# Altium footprint library CustomCase.PcbLib: 411 footprints (part 8 of 26)
Each footprint in its own frame and in the unit in brackets; x right, y up, seen from the top. Pads: shape width x height; smd on the part's side, far side on the other; paste and mask are expansions set on the pad; w line width, h text height; cw(c..) or ccw(c..) is an arc to the next point about the centre after c.
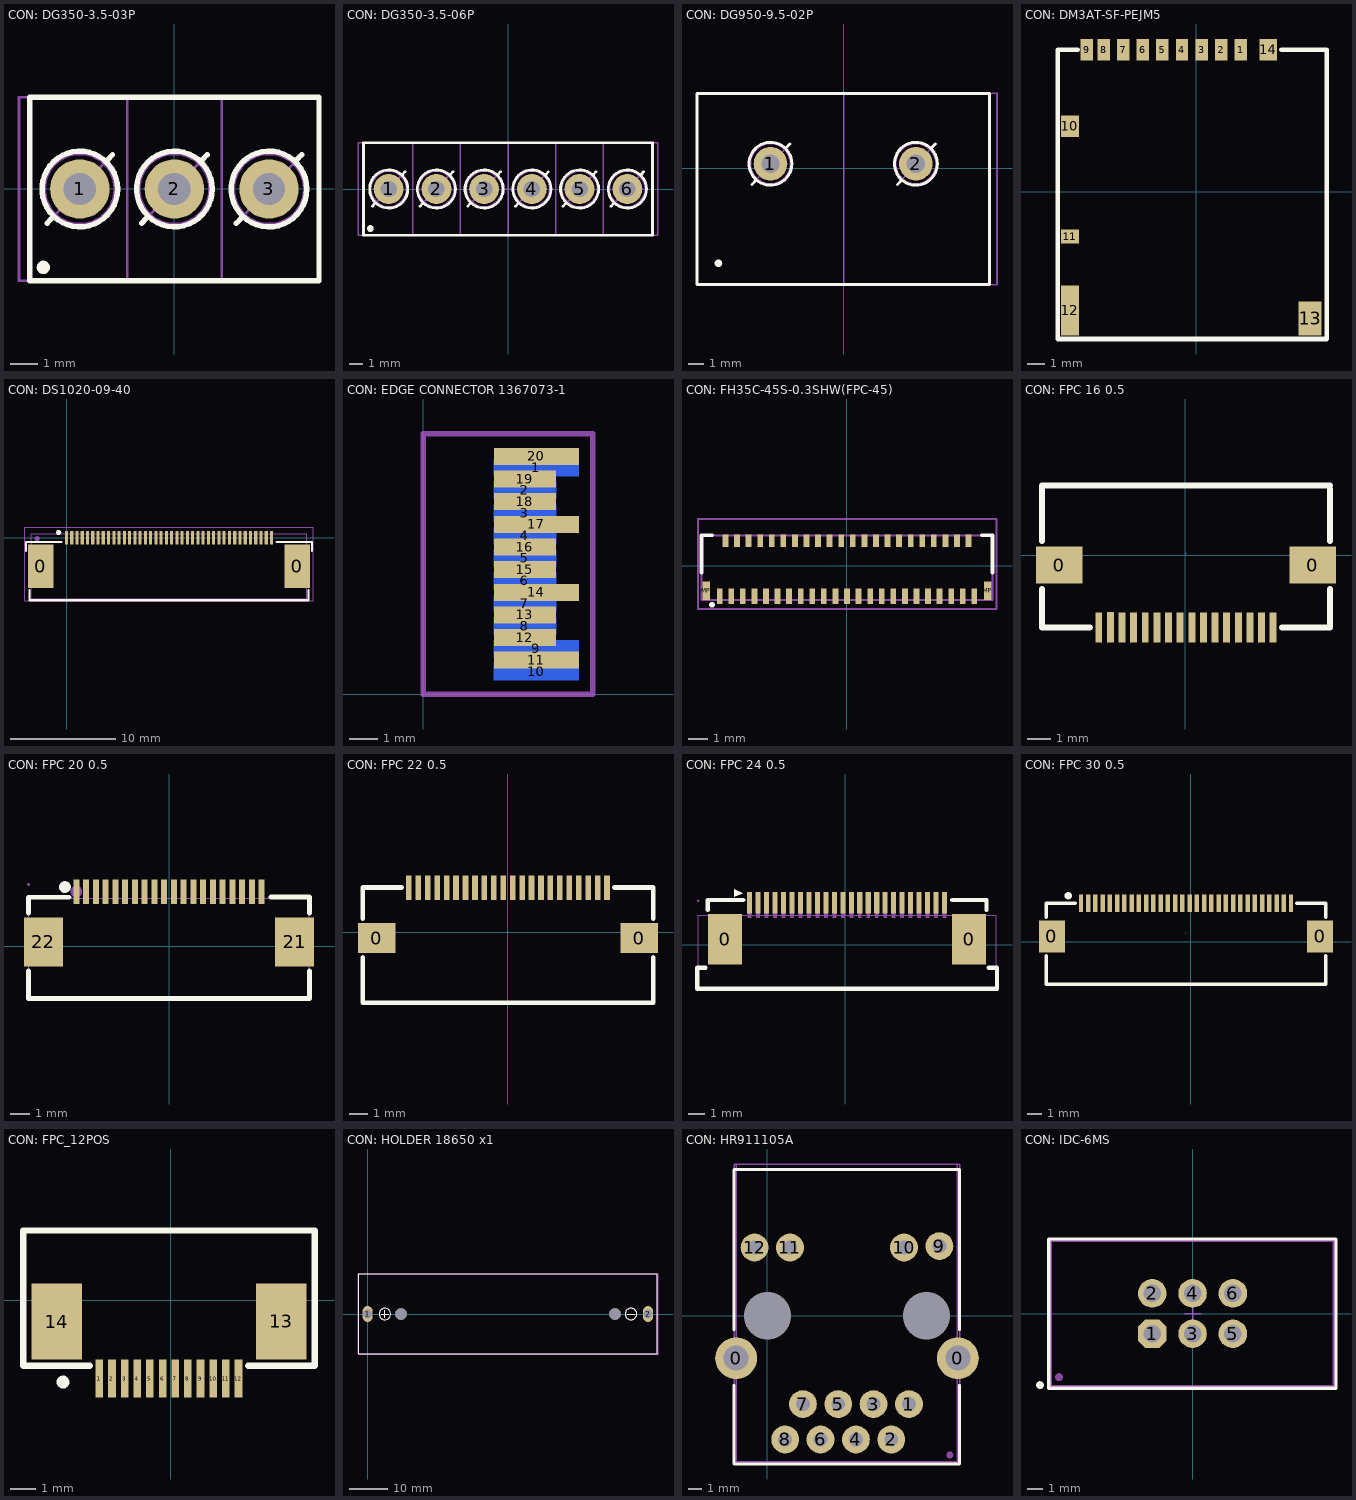
[diagram p7: the footprints below, top view; thin cyan lines are the x and y axes]

## CON: DG350-3.5-03P [mm]
pads (4):
  round 2.2 hole 1.2: 1(-3.5,0) 2(0,0) 3(3.5,0)
  round 0.5 on Top Overlay: ""(-4.85,-2.9)
Top Overlay:
  circle w0.2: c3.5,0 r1.4
  circle w0.2: c0,0 r1.4
  circle w0.2: c-3.5,0 r1.4
  lines w0.2: -4.709,-1.266 -4.526,-1.074 ; -2.474,1.074 -2.291,1.266 ; -1.209,-1.266 -1.026,-1.074 ; 1.026,1.074 1.209,1.266 ; 2.291,-1.266 2.474,-1.074 ; 4.526,1.074 4.709,1.266 ; -5.35,-3.4 5.35,-3.4 5.35,3.4 -5.35,3.4 -5.35,-3.4
Top Assy:
  circle w0.1: c-3.5,0 r1.3
  circle w0.1: c0,0 r1.3
  circle w0.1: c3.5,0 r1.3
  lines w0.1: -4.382,-0.931 -2.618,0.931 ; -1.75,-3.4 -1.75,3.4 ; -0.882,-0.931 0.882,0.931 ; 1.75,-3.4 1.75,3.4 ; 2.618,-0.931 4.382,0.931 ; -5.75,-3.4 -5.75,3.4 5.35,3.4 5.35,-3.4 -5.75,-3.4
Size Area:
  lines w0.1: -5.75,-3.4 -5.75,3.4 5.35,3.4 5.35,-3.4 -5.75,-3.4
3D body "444.STEP": height 8.4, standoff -3.5, extent -5.75,-3.4 5.75,3.4

## CON: DG350-3.5-06P [mm]
pads (7):
  round 2.2 hole 1.2: 1(-8.75,0) 2(-5.25,0) 3(-1.75,0) 4(1.75,0) 5(5.25,0) 6(8.75,0)
  round 0.5 on Top Overlay: ""(-10.1,-2.9)
Top Overlay:
  circle w0.2: c8.75,0 r1.4
  circle w0.2: c5.25,0 r1.4
  circle w0.2: c1.75,0 r1.4
  circle w0.2: c-1.75,0 r1.4
  circle w0.2: c-5.25,0 r1.4
  circle w0.2: c-8.75,0 r1.4
  lines w0.2: -9.959,-1.266 -9.776,-1.074 ; -7.724,1.074 -7.541,1.267 ; -6.459,-1.266 -6.276,-1.074 ; -4.224,1.074 -4.041,1.267 ; -2.959,-1.266 -2.776,-1.074 ; -0.724,1.074 -0.541,1.267 ; 0.541,-1.266 0.724,-1.074 ; 2.776,1.074 2.959,1.267 ; 4.041,-1.266 4.224,-1.074 ; 6.276,1.074 6.459,1.267 ; 7.541,-1.266 7.724,-1.074 ; 9.776,1.074 9.959,1.267 ; -10.6,-3.4 10.6,-3.4 10.6,3.4 -10.6,3.4 -10.6,-3.4
Top Assy:
  circle w0.1: c-8.75,0 r1.3
  circle w0.1: c-5.25,0 r1.3
  circle w0.1: c-1.75,0 r1.3
  circle w0.1: c1.75,0 r1.3
  circle w0.1: c5.25,0 r1.3
  circle w0.1: c8.75,0 r1.3
  lines w0.1: -9.632,-0.931 -7.868,0.931 ; -7,-3.4 -7,3.4 ; -6.132,-0.931 -4.368,0.931 ; -3.5,-3.4 -3.5,3.4 ; -2.632,-0.931 -0.868,0.931 ; 0,-3.4 0,3.4 ; 0.868,-0.931 2.632,0.931 ; 3.5,-3.4 3.5,3.4 ; 4.368,-0.931 6.132,0.931 ; 7,-3.4 7,3.4 ; 7.868,-0.931 9.632,0.931 ; -11,-3.4 -11,3.4 11,3.4 11,-3.4 -11,-3.4
Size Area:
  lines w0.1: -0.45,0 0.5,0 ; 0,-0.5 0,0.5 ; -11,-3.4 -11,3.4 11,3.4 11,-3.4 -11,-3.4
3D body "DG350-3.5-06P.SLDPRT": height 8.42, standoff -3.48, extent -11,-3.4 11,3.4

## CON: DG950-9.5-02P [mm]
pads (3):
  round 2.2 hole 1.2: 1(-4.8,0.3) 2(4.7,0.3)
  round 0.5 on Top Overlay: ""(-8.2,-6.2)
Top Overlay:
  circle w0.2: c4.7,0.3 r1.4
  circle w0.2: c-4.8,0.3 r1.4
  lines w0.2: -6.002,-1.052 -5.72,-0.756 ; -3.818,1.298 -3.535,1.594 ; 3.498,-1.052 3.781,-0.756 ; 5.682,1.298 5.965,1.594 ; -9.6,-7.6 9.5,-7.6 9.5,4.9 -9.6,4.9 -9.6,-7.6
Top Assy:
  circle w0.1: c4.7,0.3 r1.3
  circle w0.1: c-4.8,0.3 r1.3
  lines w0.1: -5.632,-0.631 -3.9,1.2 ; 0,-7.6 0,4.9 ; 3.868,-0.631 5.6,1.2 ; -9.6,-7.6 10,-7.6 10,4.9 -9.6,4.9 -9.6,-7.6
Size Area:
  lines w0.1: -9.6,-7.6 -9.6,4.9 10,4.9 10,-7.6 -9.6,-7.6
3D body "796739-2.SLDPRT": height 21.65, standoff -4.85, extent -9.62,-7.6 10.02,4.9

## CON: DM3AT-SF-PEJM5 [mm]
pads (14):
  rect 0.7x1.2 smd: 1(2.504,7.974) 2(1.404,7.974) 3(0.304,7.974) 4(-0.796,7.974) 5(-1.896,7.974) 6(-2.996,7.974) 7(-4.096,7.974) 8(-5.196,7.974) 9(-6.146,7.974)
  rect 1x1.2 smd: 10(-7.096,3.674) 14(4.054,7.974)
  rect 1x0.8 smd: 11(-7.096,-2.526)
  rect 1x2.8 smd: 12(-7.096,-6.676)
  rect 1.3x1.9 smd: 13(6.404,-7.126)
Top Overlay:
  lines w0.254: -6.64,7.974 -7.783,7.974 -7.783,-8.282 -7.656,-8.282 7.33,-8.282 7.33,7.974 4.79,7.974
Size Area:
  lines w0.003: -0.226,0.499 -0.226,0.5
3D body "User Library-DM3AT-SF-PEJM5.STEP": height 1.68, standoff 0, extent -7.2,-8.125 6.65,8.025

## CON: DS1020-09-40 [mm]
pads (44):
  rect 2.4x4.15 smd: 0(-2.45,-2.7) 0(21.95,-2.7)
  rect 0.3x1.25 smd: 1(0,0) 2(0.5,0) 3(1,0) 4(1.5,0) 5(2,0) 6(2.5,0) 7(3,0) 8(3.5,0) 9(4,0) 10(4.5,0) 11(5,0) 12(5.5,0) 13(6,0) 14(6.5,0) 15(7,0) 16(7.5,0) 17(8,0) 18(8.5,0) 19(9,0) 20(9.5,0) 21(10,0) 22(10.5,0) 23(11,0) 24(11.5,0) 25(12,0) 26(12.5,0) 27(13,0) 28(13.5,0) 29(14,0) 30(14.5,0) 31(15,0) 32(15.5,0) 33(16,0) 34(16.5,0) 35(17,0) 36(17.5,0) 37(18,0) 38(18.5,0) 39(19,0) 40(19.5,0)
  round 0.5 on Mech1: ""(-2.8,-0.1)
  round 0.5 on Top Overlay: ""(-0.75,0.5)
Top Overlay:
  lines w0.2: -3.875,-1.25 -3.875,-0.4 -3.85,-0.4 -3.8,-0.4 -0.5,-0.4 ; -3.525,-5 -3.525,-5.95 23,-5.95 23.025,-5.95 23.025,-5 ; 20,-0.4 23.3,-0.4 23.35,-0.4 23.375,-0.4 23.375,-1.25
Top Assy:
  lines w0.1: -3.375,-5.8 -3.375,0.4 22.875,0.4 22.875,-5.8 -3.375,-5.8
Size Area:
  lines w0.1: -4,-6 -4,1 23.5,1 23.5,-6 -4,-6
3D body "4-1734844-0.stp": height 1.88, standoff -0.02, extent -3.375,-5.8 22.875,0.4

## CON: EDGE CONNECTOR 1367073-1 [mm]
pads (20):
  rect 3x0.6 smd far side mask+0.102: 1(4,8) 9(4,1.6) 10(4,0.8)
  rect 2.2x0.6 smd far side mask+0.102: 2(3.6,7.2) 3(3.6,6.4) 4(3.6,5.6) 5(3.6,4.8) 6(3.6,4) 7(3.6,3.2) 8(3.6,2.4)
  rect 3x0.6 smd mask+0.102: 11(4,1.2) 14(4,3.6) 17(4,6) 20(4,8.4)
  rect 2.2x0.6 smd mask+0.102: 12(3.6,2) 13(3.6,2.8) 15(3.6,4.4) 16(3.6,5.2) 18(3.6,6.8) 19(3.6,7.6)
Top Solder:
  rectangle: 2.5,0.5 5.5,8.7
Bottom Solder:
  rectangle: 2.5,0.5 5.5,8.7
Size Area:
  lines w0.2: 0,0 6,0 6,9.2 0,9.2 0,0

## CON: FH35C-45S-0.3SHW(FPC-45) [mm]
pads (47):
  rect 0.3x0.8 smd: 1(-6.596,-1.563) 3(-5.996,-1.563) 5(-5.396,-1.563) 7(-4.796,-1.563) 9(-4.196,-1.563) 11(-3.596,-1.563) 13(-2.996,-1.563) 15(-2.396,-1.563) 17(-1.796,-1.563) 19(-1.196,-1.563) 21(-0.596,-1.563) 23(0.004,-1.563) 25(0.604,-1.563) 27(1.204,-1.563) 29(1.804,-1.563) 31(2.404,-1.563) 33(3.004,-1.563) 35(3.604,-1.563) 37(4.204,-1.563) 39(4.804,-1.563) 41(5.404,-1.563) 43(6.004,-1.563) 45(6.604,-1.563)
  rect 0.3x0.65 smd: 2(-6.296,1.312) 4(-5.696,1.312) 6(-5.096,1.312) 8(-4.496,1.312) 10(-3.896,1.312) 12(-3.296,1.312) 14(-2.696,1.312) 16(-2.096,1.312) 18(-1.496,1.312) 20(-0.896,1.312) 22(-0.296,1.312) 24(0.304,1.312) 26(0.904,1.312) 28(1.504,1.312) 30(2.104,1.312) 32(2.704,1.312) 34(3.304,1.312) 36(3.904,1.312) 38(4.504,1.312) 40(5.104,1.312) 42(5.704,1.312) 44(6.304,1.312)
  rect 0.4x0.95 smd: MP(-7.296,-1.288) MP(7.304,-1.288)
Top Overlay:
  lines w0.2: -7.546,1.587 -7.546,-0.338 -7.546,1.587 ; -7.546,1.587 -6.996,1.587 -7.546,1.587 ; -7.046,-2.013 ccw(c-6.996,-2.013) -6.946,-2.013 ; -7.046,-2.013 cw(c-6.996,-2.013) -6.946,-2.013 ; -7.046,-2.013 ccw(c-6.996,-2.013) -6.946,-2.013 ; 7.554,1.587 7.004,1.587 7.554,1.587 ; 7.554,1.587 7.554,-0.338 7.554,1.587
3D model:
  lines w0.1: -7.546,-1.763 7.554,-1.763 7.554,1.587 -7.546,1.587 -7.546,-1.763
Size Area:
  lines w0.1: -7.725,-2.225 -7.725,2.425 7.75,2.425 7.75,-2.225 -7.725,-2.225
3D body "FH35-45S-0.3SHW.stp": height 0.84, standoff -0.06, extent -7.535,-1.817 7.565,2.383

## CON: FPC 16 0.5 [mm]
pads (18):
  rect 2x1.6 smd: 0(-5.41,-0.43) 0(5.49,-0.43)
  rect 0.3x1.3 smd: 1(3.788,-3.11) 2(3.288,-3.11) 3(2.788,-3.11) 4(2.288,-3.11) 5(1.788,-3.11) 6(1.288,-3.11) 7(0.788,-3.11) 8(0.288,-3.11) 9(-0.212,-3.11) 10(-0.712,-3.11) 11(-1.212,-3.11) 12(-1.712,-3.11) 13(-2.212,-3.11) 14(-2.712,-3.11) 15(-3.214,-3.108) 16(-3.712,-3.11)
Top Overlay:
  lines w0.254: -6.16,-1.461 -6.16,-3.11 -4.093,-3.11 ; -6.16,0.601 -6.16,2.99 6.24,2.99 ; 4.169,-3.11 6.24,-3.11 6.24,-1.461 ; 6.24,0.601 6.24,2.837
Size Area:
  lines w0.003: 0.015,0.058 0.065,0.109
3D body "FPC_12Pos_3D.stp": height 1.88, standoff -0.02, extent -6.7,-2.325 6.8,2.975

## CON: FPC 20 0.5 [mm]
pads (22):
  rect 0.3x1.25 smd paste+0 mask+0.05: 1(-4.75,2.8) 2(-4.25,2.8) 3(-3.75,2.8) 4(-3.25,2.8) 5(-2.75,2.8) 6(-2.25,2.8) 7(-1.75,2.8) 8(-1.25,2.8) 9(-0.75,2.8) 10(-0.25,2.8) 11(0.25,2.8) 12(0.75,2.8) 13(1.25,2.8) 14(1.75,2.8) 15(2.25,2.8) 16(2.75,2.8) 17(3.25,2.8) 18(3.75,2.8) 19(4.25,2.8) 20(4.75,2.8)
  rect 2x2.5 smd paste+0 mask+0.05: 21(6.44,0.225) 22(-6.44,0.225)
Top Overlay:
  circle w0.3: c-5.334,3.036 r0.15
  lines w0.254: -7.2,-1.256 -7.2,-2.4 -7.2,-2.679 7.2,-2.679 7.2,-2.4 7.2,-1.256 ; -7.2,1.706 -7.2,2.512 -5.131,2.512 ; 5.223,2.528 7.2,2.528 7.2,1.706
Mechanical 6:
  circle w0.3: c-4.75,2.8 r0.15
Size Area:
  region: -7.14,3.175 -7.14,3.15 -7.175,3.115 -7.225,3.115 -7.26,3.15 -7.26,3.175 -7.26,3.2 -7.225,3.235 -7.175,3.235 -7.14,3.2
  region: 4.675,3.175 4.825,3.175 4.825,2.425 4.675,2.425
  region: 4.175,3.175 4.325,3.175 4.325,2.425 4.175,2.425
  region: 3.675,3.175 3.825,3.175 3.825,2.425 3.675,2.425
  region: 3.175,3.175 3.325,3.175 3.325,2.425 3.175,2.425
  region: 2.675,3.175 2.825,3.175 2.825,2.425 2.675,2.425
  region: 2.175,3.175 2.325,3.175 2.325,2.425 2.175,2.425
  region: 1.675,3.175 1.825,3.175 1.825,2.425 1.675,2.425
  region: 1.175,3.175 1.325,3.175 1.325,2.425 1.175,2.425
  region: 0.675,3.175 0.825,3.175 0.825,2.425 0.675,2.425
  region: 0.175,3.175 0.325,3.175 0.325,2.425 0.175,2.425
  region: -0.325,3.175 -0.175,3.175 -0.175,2.425 -0.325,2.425
  region: -0.825,3.175 -0.675,3.175 -0.675,2.425 -0.825,2.425
  region: -1.325,3.175 -1.175,3.175 -1.175,2.425 -1.325,2.425
  region: -1.825,3.175 -1.675,3.175 -1.675,2.425 -1.825,2.425
  region: -2.325,3.175 -2.175,3.175 -2.175,2.425 -2.325,2.425
  region: -2.825,3.175 -2.675,3.175 -2.675,2.425 -2.825,2.425
  region: -3.325,3.175 -3.175,3.175 -3.175,2.425 -3.325,2.425
  region: -3.825,3.175 -3.675,3.175 -3.675,2.425 -3.825,2.425
  region: -4.325,3.175 -4.175,3.175 -4.175,2.425 -4.325,2.425
  region: -4.825,3.175 -4.675,3.175 -4.675,2.425 -4.825,2.425
  region: 6,-0.275 6,0.725 7.2,0.725 7.2,-0.275
  region: -7.2,-0.275 -7.2,0.725 -6,0.725 -6,-0.275
  lines w0.051: -7.2,-2.645 -7.2,2.475 7.2,2.475 7.2,-2.645 -7.2,-2.645
3D body: height 2, standoff 0, extent -7.216,-2.635 7.184,2.486

## CON: FPC 22 0.5 [mm]
pads (24):
  rect 2x1.6 smd: 0(-6.949,-0.307) 0(6.951,-0.307)
  rect 0.3x1.3 smd: 1(5.249,2.37) 2(4.749,2.37) 3(4.251,2.371) 4(3.749,2.37) 5(3.249,2.37) 6(2.749,2.37) 7(2.249,2.37) 8(1.749,2.37) 9(1.249,2.37) 10(0.749,2.37) 11(0.249,2.37) 12(-0.251,2.37) 13(-0.751,2.37) 14(-1.249,2.371) 15(-1.751,2.37) 16(-2.251,2.37) 17(-2.751,2.37) 18(-3.251,2.37) 19(-3.751,2.37) 20(-4.251,2.37) 21(-4.751,2.37) 22(-5.251,2.37)
Top Overlay:
  lines w0.254: -7.699,-1.338 -7.699,-3.727 7.701,-3.727 7.701,-1.338 ; -7.699,0.724 -7.699,2.373 -5.632,2.373 ; 5.63,2.373 7.701,2.373 7.701,0.724
Size Area:
  lines w0.003: -0.024,-0.026 0.026,0.025
3D body "FPC_22_02_3D.stp": height 1.82, standoff -0.05, extent -8.274,-2.4 8.226,2.5

## CON: FPC 24 0.5 [mm]
pads (26):
  rect 2x3 smd paste+0 mask+0.05: 0(-7.094,0.308) 0(7.306,0.308)
  rect 0.3x1.25 smd paste+0 mask+0.05: 1(-5.644,2.47) 2(-5.144,2.47) 3(-4.644,2.47) 4(-4.144,2.47) 5(-3.644,2.47) 6(-3.144,2.47) 7(-2.644,2.47) 8(-2.144,2.47) 9(-1.644,2.47) 10(-1.144,2.47) 11(-0.644,2.47) 12(-0.144,2.47) 13(0.356,2.47) 14(0.856,2.47) 15(1.356,2.47) 16(1.856,2.47) 17(2.356,2.47) 18(2.856,2.47) 19(3.356,2.47) 20(3.856,2.47) 21(4.356,2.47) 22(4.856,2.47) 23(5.356,2.47) 24(5.856,2.47)
Top Overlay:
  region: -6.04,3.014 -6.548,3.268 -6.548,2.823
  lines w0.254: -8.248,-1.363 -8.744,-1.363 -8.744,-2.613 8.956,-2.613 8.956,-1.363 8.46,-1.363 ; -8.126,2.037 -8.126,2.633 -6.025,2.633 ; 6.306,2.633 8.338,2.633 8.338,2.037
Mechanical 6:
  region: -6.04,3.014 -6.548,3.268 -6.548,2.823
Size Area:
  region: -8.634,2.587 -8.634,2.612 -8.669,2.647 -8.719,2.647 -8.754,2.612 -8.754,2.587 -8.754,2.562 -8.719,2.527 -8.669,2.527 -8.634,2.562
  region: 5.756,2.587 5.956,2.587 5.956,1.587 5.756,1.587
  region: 5.256,2.587 5.456,2.587 5.456,1.587 5.256,1.587
  region: 4.756,2.587 4.956,2.587 4.956,1.587 4.756,1.587
  region: 4.256,2.587 4.456,2.587 4.456,1.587 4.256,1.587
  region: 3.756,2.587 3.956,2.587 3.956,1.587 3.756,1.587
  region: 3.256,2.587 3.456,2.587 3.456,1.587 3.256,1.587
  region: 2.756,2.587 2.956,2.587 2.956,1.587 2.756,1.587
  region: 2.256,2.587 2.456,2.587 2.456,1.587 2.256,1.587
  region: 1.756,2.587 1.956,2.587 1.956,1.587 1.756,1.587
  region: 1.256,2.587 1.456,2.587 1.456,1.587 1.256,1.587
  region: 0.756,2.587 0.956,2.587 0.956,1.587 0.756,1.587
  region: 0.256,2.587 0.456,2.587 0.456,1.587 0.256,1.587
  region: -0.244,2.587 -0.044,2.587 -0.044,1.587 -0.244,1.587
  region: -0.744,2.587 -0.544,2.587 -0.544,1.587 -0.744,1.587
  region: -1.244,2.587 -1.044,2.587 -1.044,1.587 -1.244,1.587
  region: -1.744,2.587 -1.544,2.587 -1.544,1.587 -1.744,1.587
  region: -2.244,2.587 -2.044,2.587 -2.044,1.587 -2.244,1.587
  region: -2.744,2.587 -2.544,2.587 -2.544,1.587 -2.744,1.587
  region: -3.244,2.587 -3.044,2.587 -3.044,1.587 -3.244,1.587
  region: -3.744,2.587 -3.544,2.587 -3.544,1.587 -3.744,1.587
  region: -4.244,2.587 -4.044,2.587 -4.044,1.587 -4.244,1.587
  region: -4.744,2.587 -4.544,2.587 -4.544,1.587 -4.744,1.587
  region: -5.244,2.587 -5.044,2.587 -5.044,1.587 -5.244,1.587
  region: -5.744,2.587 -5.544,2.587 -5.544,1.587 -5.744,1.587
  region: 6.506,1.508 8.106,1.508 8.106,-0.892 6.506,-0.892
  region: -7.894,1.508 -6.294,1.508 -6.294,-0.892 -7.894,-0.892
  lines w0.051: -8.694,-2.613 -8.694,1.737 8.906,1.737 8.906,-2.613 -8.694,-2.613
3D body "2-1734839-4.stp": height 2, standoff -0.05, extent -8.609,-2.623 8.821,2.487

## CON: FPC 30 0.5 [mm]
pads (32):
  rect 1.8x2.2 smd: 0(-9.591,0.367) 0(8.909,0.367)
  rect 0.3x1.199 smd: 1(-7.591,2.667)
  rect 0.3x1.2 smd: 2(-7.091,2.667) 3(-6.591,2.667) 4(-6.091,2.667) 5(-5.591,2.667) 6(-5.091,2.667) 7(-4.591,2.667) 8(-4.091,2.667) 9(-3.591,2.667) 10(-3.091,2.667) 11(-2.591,2.667) 12(-2.091,2.667) 13(-1.591,2.667) 14(-1.091,2.667) 15(-0.591,2.667) 16(-0.091,2.667) 17(0.409,2.667) 18(0.909,2.667) 19(1.409,2.667) 20(1.909,2.667) 21(2.409,2.667) 22(2.909,2.667) 23(3.409,2.667) 24(3.909,2.667) 25(4.409,2.667) 26(4.909,2.667) 27(5.409,2.667) 28(5.909,2.667) 29(6.409,2.667) 30(6.909,2.667)
Top Overlay:
  circle w0.254: c-8.469,3.175 r0.127
  lines w0.254: -9.991,-0.964 -9.991,-2.921 9.311,-2.921 9.311,-0.964 ; -9.991,1.698 -9.991,2.667 -7.972,2.667 ; 7.406,2.667 7.29,2.667 9.311,2.667 9.311,1.698
Size Area:
  lines w0.003: -0.366,0.567 -0.316,0.618
3D body "FPC_30Pos_0.5mm.stp": height 1.9, standoff 0.03, extent -10.591,-2.15 9.909,2.75

## CON: FPC_12POS [mm]
pads (14):
  rect 0.3x1.5 smd: 1(-2.817,-3.085) 2(-2.317,-3.085) 3(-1.817,-3.085) 4(-1.317,-3.085) 5(-0.817,-3.085) 6(-0.317,-3.085) 7(0.183,-3.085) 8(0.683,-3.085) 9(1.183,-3.085) 10(1.683,-3.085) 11(2.183,-3.085) 12(2.683,-3.085)
  rect 2x3 smd: 13(4.367,-0.825) 14(-4.493,-0.831)
Top Overlay:
  circle w0.254: c-4.254,-3.225 r0.127
  lines w0.254: -5.819,-2.583 -5.819,2.767 ; -5.811,-2.583 -3.198,-2.583 ; -5.801,2.767 5.701,2.767 5.701,-2.583 3.064,-2.583
3D body "FPC_12Pos.stp": height 1.82, standoff -0.05, extent -5.8,-2.35 5.7,2.55

## CON: HOLDER 18650 x1 [mm]
pads (4):
  oval 2.6x4.2 hole 2.4 square: 1(0,0) 2(72.9,0)
  round 0 hole 3.2: 2(8.7,0) 2(64.3,0)
Top Overlay:
  circle w0.2: c68.5,0 r1.5
  circle w0.2: c4.5,0 r1.5
  lines w0.2: 3.5,0 5.5,0 ; 4.5,-1 4.5,1 ; 67.5,0 69.5,0 ; -2.325,-10.4 75.325,-10.4 75.325,10.4 -2.325,10.4 -2.325,-10.4
Top Assy:
  lines w0.1: -2.325,-10.4 -2.325,10.4 75.325,10.4 75.325,-10.4 -2.325,-10.4
3D model:
  circle w0.1: c4.5,0 r1.5
  circle w0.1: c68.5,0 r1.5
  lines w0.1: 3.5,0 5.5,0 ; 4.5,-1 4.5,1 ; 67.5,0 69.5,0
Size Area:
  lines w0.1: -2.5,-10.5 75.5,-10.5 75.5,10.5 -2.5,10.5 -2.5,-10.5
3D body "User Library-18650 Full.STEP": height 21.65, standoff -3.83, extent -2.325,-10.4 75.325,10.4

## CON: HR911105A [mm]
height 14
pads (17):
  round 3 hole 1.8: 0(-2.25,-3.05) 0(13.68,-3.05)
  oval 0.7x0 hole 3.4: 0(0,0) 0(11.43,0)
  round 2 hole 1: 1(10.165,-6.35) 2(8.895,-8.89) 3(7.625,-6.35) 4(6.355,-8.89) 5(5.085,-6.35) 6(3.815,-8.89) 7(2.545,-6.35) 8(1.275,-8.89) 9(12.35,5) 10(9.81,4.9) 11(1.62,4.9) 12(-0.92,4.9)
  round 0.5 on Mech1: ""(13.1,-10)
Top Overlay:
  lines w0.2: -2.4,-5 -2.4,-10.65 13.8,-10.65 13.8,-5 ; -2.4,-1 -2.4,10.5 13.8,10.5 13.8,-1
Top Assy:
  lines w0.1: -2.24,-10.5 13.64,-10.5 13.64,10.9 -2.24,10.9 -2.24,-10.5
Size Area:
  lines w0.1: -2.4,-10.6 13.8,-10.6 13.8,10.9 -2.4,10.9 -2.4,-1 -2.4,-10.6
3D body "User Library-HR911105A.STEP": height 13.6, standoff -2.9, extent -2.24,-10.5 13.64,10.9

## CON: IDC-6MS [mm] "IDC-6MS 6 pin PCB-mount connector"
height 10
pads (8):
  oct 1.8x1.8 hole 1.1: 1(-2.54,-1.27)
  round 1.8 hole 1.1: 2(-2.54,1.27) 3(0,-1.27) 4(0,1.27) 5(2.54,-1.27) 6(2.54,1.27)
  round 0.5 on Top Overlay: ""(-9.6,-4.5)
  round 0.5 on Mech1: ""(-8.4,-4)
Top Overlay:
  lines w0.2: -9.05,-4.7 -9.05,4.7 9.025,4.7 9.025,-4.7 -9.05,-4.7
Top Assy:
  lines w0.1: -8.89,-4.55 8.87,-4.55 8.87,4.55 -8.89,4.55 -8.89,-4.55
Size Area:
  lines w0.1: -0.5,0 0.5,0 ; 0,-0.5 0,0.5 ; -8.975,-4.65 -8.975,4.65 8.975,4.65 8.975,-4.65 -8.975,-4.65
3D body "IDC-6MS.STEP": height 9, standoff -3, extent -8.89,-4.55 8.87,4.55